# Altium schematic symbol library 47.5 kΩ.SchLib: 1 symbol
Pins are listed as number, name and electrical type; pins without a type are passive.

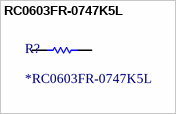
[diagram p0: symbol RC0603FR-0747K5L]

## RC0603FR-0747K5L
designator R?, comment *RC0603FR-0747K5L
47.5 kΩ; Supplier 1: Newark; Supplier Part Number 1: RC0603FR-0747K5L; JLCPCB Part #: C137715
footprint R_0603_1608Metric (Chip Resistor, 2-Leads, Body 1.60x0.80mm, IPC Medium Density)
pins: 1, 2